# Altium schematic symbol library GRF2543.SchLib: 1 symbol
Pins are listed as number, name and electrical type; pins without a type are passive.

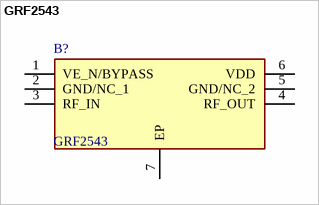
[diagram p0: symbol GRF2543]

## GRF2543
designator B?
RF Amplifier High Gain, LNA with Bypass; IEEE 802.11 a/n/ac/p, 4.9 - 6.0 GHz; Manufacturer_Name: Guerrilla RF; Geometry.Height: 0.45mm; Mouser Part Number: 459-GRF2543; Mouser Price/Stock: https://www.mouser.co.uk/ProductDetail/Guerrilla-RF/GRF2543?qs=PqoDHHvF64%2FihZz%2FtUpOTQ%3D%3D; Manufacturer_Part_Number: GRF2543; Datasheet Link: https://www.guerrilla-rf.com/products/DataSheet?sku=2543&file_name=GRF2543DS.pdf
footprint SON50P150X150X45-7N
pins: 1 VE_N/BYPASS, 2 GND/NC_1, 3 RF_IN, 4 RF_OUT, 5 GND/NC_2, 6 VDD, 7 EP